# Altium integrated library Modulos.IntLib: 25 symbols
Pins are listed as number, name and electrical type; pins without a type are passive.

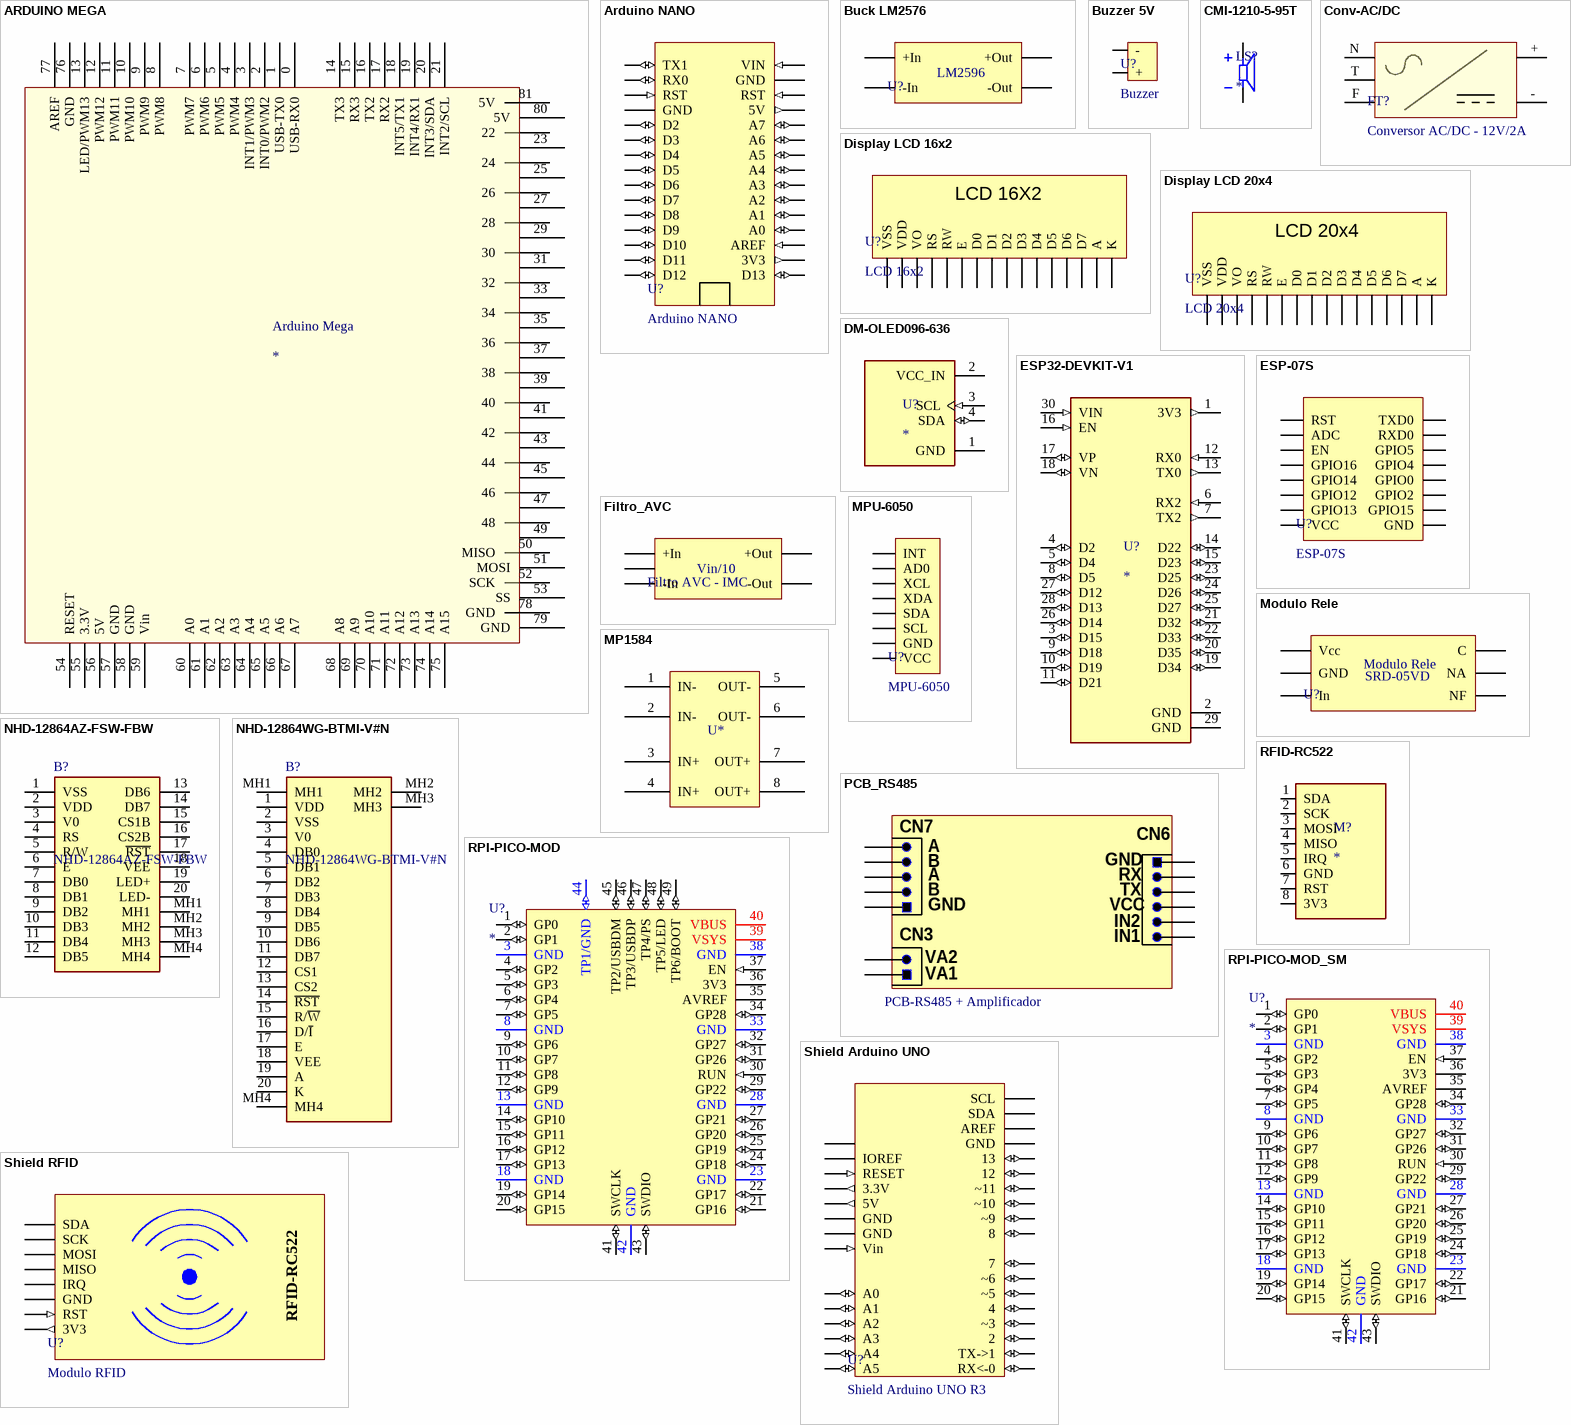
[diagram p0: symbols ARDUINO MEGA to Shield RFID]

## ARDUINO MEGA
designator Arduino Mega
footprint ARDUINO MEGA (Arduino Mega 2560)
pins: 0 USB-RX0, 1 USB-TX0, 2 INT0/PWM2, 3 INT1/PWM3, 4 PWM4, 5 PWM5, 6 PWM6, 7 PWM7, 8 PWM8, 9 PWM9, 10 PWM10, 11 PWM11, 12 PWM12, 13 LED/PWM13, 14 TX3, 15 RX3, 16 TX2, 17 RX2, 18 INT5/TX1, 19 INT4/RX1, 20 INT3/SDA, 21 INT2/SCL, 22, 23, 24, 25, 26, 27, 28, 29, 30, 31, 32, 33, 34, 35, 36, 37, 38, 39, 40, 41, 42, 43, 44, 45, 46, 47, 48, 49, 50 MISO, 51 MOSI, 52 SCK, 53 SS, 54 RESET, 55 3.3V, 56 5V, 57 GND, 58 GND, 59 Vin, 60 A0, 61 A1, 62 A2, 63 A3, 64 A4, 65 A5, 66 A6, 67 A7, 68 A8, 69 A9, 70 A10, 71 A11, 72 A12, 73 A13, 74 A14, 75 A15, 76 GND, 77 AREF, 78 GND, 79 GND, 80 5V, 81 5V

## Arduino NANO
designator U?
footprint Arduino NANO
pins: 0 D13 (io), 1 3V3 (out), 2 AREF (in), 3 A0 (io), 4 A1 (io), 5 A2 (io), 6 A3 (io), 7 A4 (io), 8 A5 (io), 9 A6 (io), 10 A7 (io), 11 5V (out), 12 RST (in), 13 GND (power), 14 VIN (in), 15 D12 (io), 16 D11 (io), 17 D10 (io), 18 D9 (io), 19 D8 (io), 20 D7 (io), 21 D6 (io), 22 D5 (io), 23 D4 (io), 24 D3 (io), 25 D2 (io), 26 GND (power), 27 RST (in), 28 RX0 (io), 29 TX1 (io)

## Buck LM2576
designator U?, comment Buck  (value not drawn)
Conversor DC-DC LM2576
footprint Buck LM2596
pins: 1 -In, 2 +In, 3 +Out, 4 -Out
text: LM2596

## Buzzer 5V
designator U?, comment Buzzer
Buzzers Indicator, Internally Driven Magnetic 5V 30mA 2.73kHz 82dB @ 5V, 10cm Through Hole PC Pins; Partnumber: AI-1027-TWT-5V-2-R
footprint Buzzer (AI-1027-TWT-5V-2-R)
pins: 1 +, 2 -

## CMI-1210-5-95T
designator LS?
12 mm, 5 Vdc, 98 dB, Through Hole, Magnetic Audio Indicator Buzzer; MF: Same Sky; MP: CMI-1210-5-95T; SnapEDA_Link: https://www.snapeda.com/parts/CMI-1210-5-95T/Same+Sky/view-part/?ref=snap; Package: None; Value: *; Check_prices: https://www.snapeda.com/parts/CMI-1210-5-95T/Same+Sky/view-part/?ref=eda
footprint XDCR_CMI-1210-5-95T
pins: N, P

## Conv-AC/DC
designator FT?, comment Conversor AC/DC - 12V/2A
Fonte chaveada AC/DC
pins: + 4, - 5, F 1, N 3, T 2

## Display LCD 16x2
designator U?, comment LCD 16x2
footprint LCD 16X2
pins: A, D0, D1, D2, D3, D4, D5, D6, D7, E, K, RS, RW, VDD, VO, VSS
text: LCD 16X2

## Display LCD 20x4
designator U?, comment LCD 20x4
footprint LCD 20X4
pins: A, D0, D1, D2, D3, D4, D5, D6, D7, E, K, RS, RW, VDD, VO, VSS

## DM-OLED096-636
designator U?
0.96â€ 128 X 64 MONOCHROME GRAPHIC OLED DISPLAY MODULE - I2C; MP: DM-OLED096-636; SnapEDA_Link: https://www.snapeda.com/parts/DM-OLED096-636/Display+Module/view-part/?ref=snap; Package: Package; Value: *; MF: Display Module; Check_prices: https://www.snapeda.com/parts/DM-OLED096-636/Display+Module/view-part/?ref=eda
footprint MODULE_DM-OLED096-636
pins: 1 GND (power), 2 VCC_IN (power), 3 SCL (in), 4 SDA (io)

## ESP32-DEVKIT-V1
designator U?
Dual core, Wi-Fi: 2.4 GHz up to 150 Mbits/s,BLE (Bluetooth Low Energy) and legacy Bluetooth, 32 bits, Up to 240 MHz; MF: Do it; MP: ESP32-DEVKIT-V1; SnapEDA_Link: https://www.snapeda.com/parts/ESP32-DEVKIT-V1/Do+it/view-part/?ref=snap; Package: None; Value: *; Check_prices: https://www.snapeda.com/parts/ESP32-DEVKIT-V1/Do+it/view-part/?ref=eda
footprint MODULE_ESP32_DEVKIT_V1
pins: 1 3V3 (out), 2 GND (power), 3 D15 (io), 4 D2 (io), 5 D4 (io), 6 RX2 (in), 7 TX2 (out), 8 D5 (io), 9 D18 (io), 10 D19 (io), 11 D21 (io), 12 RX0 (in), 13 TX0 (out), 14 D22 (io), 15 D23 (io), 16 EN (in), 17 VP (io), 18 VN (io), 19 D34 (io), 20 D35 (io), 21 D32 (io), 22 D33 (io), 23 D25 (io), 24 D26 (io), 25 D27 (io), 26 D14 (io), 27 D12 (io), 28 D13 (io), 29 GND (power), 30 VIN (in)

## ESP-07S
designator U?
WiFi Module 2.4GHz ESP-07S
footprint ESP-07S (ESP-07S WIFI MODULE)
pins: 1 RST, 2 ADC, 3 EN, 4 GPIO16, 5 GPIO14, 6 GPIO12, 7 GPIO13, 8 VCC, 9 GND, 10 GPIO15, 11 GPIO2, 12 GPIO0, 13 GPIO4, 14 GPIO5, 15 RXD0, 16 TXD0

## Filtro_AVC
designator Filtro AVC - IMC, comment Filtro AVC  (value not drawn)
Filtro para leitura de tensão AVC (Div10)
pins: +In, +Out, -In, -Out, NC
text: Vin/10

## Modulo Rele
designator U?  (value not drawn)
Modulo Rele Arduino
pins: C, GND, In, NA, NF, Vcc
text: SRD-05VD

## MP1584
designator U*, comment DC-DC Regulator  (value not drawn)
MP1584 DC to DC Converter and Switching Regulator Chip 0.8VDC to 18VDC Output Development Tool
footprint MP1584 (MP1584 DC to DC Converter and Switching Regulator Chip 0.8VDC to 18VDC Output Development Tool)
pins: 1 IN-, 2 IN-, 3 IN+, 4 IN+, 5 OUT-, 6 OUT-, 7 OUT+, 8 OUT+

## MPU-6050
designator U?
Triple Axis Accelerometer and Gyro Breakout Board‎
footprint MPU-6050
pins: AD0, GND, INT, SCL, SDA, VCC, XCL, XDA

## NHD-12864AZ-FSW-FBW
designator B?
LCD Graphic Display Modules & Accessories 128 x 64 FSTN(+) 93.0 x 70.0; Manufacturer_Name: Newhaven Display; Geometry.Height: 10.6mm; Mouser Part Number: 763-NHD12864AZFSWFBW; Mouser Price/Stock: https://www.mouser.co.uk/ProductDetail/Newhaven-Display/NHD-12864AZ-FSW-FBW?qs=3vk7fz9CmNxdfqtmwt0T7w%3D%3D; Manufacturer_Part_Number: NHD-12864AZ-FSW-FBW; Datasheet Link: https://componentsearchengine.com/Datasheets/1/NHD-12864AZ-FSW-FBW.pdf
footprint NHD12864AZFSWFBW
pins: 1 VSS, 2 VDD, 3 V0, 4 RS, 5 R/W, 6 E, 7 DB0, 8 DB1, 9 DB2, 10 DB3, 11 DB4, 12 DB5, 13 DB6, 14 DB7, 15 CS1B, 16 CS2B, 17 ~{RST}, 18 VEE, 19 LED+, 20 LED-, MH1, MH2, MH3, MH4

## NHD-12864WG-BTMI-V#N
designator B?
LCD MOD GRAPH 128X64 WH TRANSM; Manufacturer_Name: Newhaven Display; Geometry.Height: 8.9mm; Mouser Part Number: 763-12864WG-BTMI-VN; Mouser Price/Stock: https://www.mouser.co.uk/ProductDetail/Newhaven-Display/NHD-12864WG-BTMI-VN?qs=Vb5qD4CGh4lOc3Gh14yA5A%3D%3D; Manufacturer_Part_Number: NHD-12864WG-BTMI-V#N; Datasheet Link: http://www.newhavendisplay.com/specs/NHD-12864WG-BTMI-VN.pdf
footprint NHD12864WGBTMIVN
pins: 1 VDD, 2 VSS, 3 V0, 4 DB0, 5 DB1, 6 DB2, 7 DB3, 8 DB4, 9 DB5, 10 DB6, 11 DB7, 12 CS1, 13 CS2, 14 ~{RST}, 15 R/~{W}, 16 D/~{I}, 17 E, 18 VEE, 19 A, 20 K, MH1, MH2, MH3, MH4

## PCB_RS485
designator PCB?, comment PCB-RS485 + Amplificador
pins: 1, 2, 3, 4, 5, 6, 7, 8, 9, 10, 11, 12, 13
text: CN7; CN6; A; GND; B; RX; TX; VCC; IN2; CN3; IN1; VA2; VA1

## RFID-RC522
designator M?
Development kit in an integrated reader/writer IC MFRC522 for contactless communication at 13.56 MHz.; MF: Handson Technology; MP: RFID-RC522; SnapEDA_Link: https://www.snapeda.com/parts/RFID-RC522/Handson+Technology/view-part/?ref=snap; Package: Package; Value: *; Check_prices: https://www.snapeda.com/parts/RFID-RC522/Handson+Technology/view-part/?ref=eda
footprint RFID-RC522
pins: 1 SDA (io), 2 SCK (io), 3 MOSI (io), 4 MISO (io), 5 IRQ (io), 6 GND (io), 7 RST (io), 8 3V3 (io)

## RPI-PICO-MOD
designator U?
RASPBERRY PI PICO RP2040 BOARD; Manufacturer: Raspberry Pi Foundation; Manufacturer Part No: SC0915; Mounting Technology: SMT; Supplier: DigiKey; Supplier Part No: 2648-SC0915CT-ND; Supplier Link: https://www.digikey.com/en/products/detail/raspberry-pi/SC0915/13684020
footprint RPI-PICO-MOD (RASPBERRY PI PICO RP2040 BOARD)
pins: 1 GP0 (io), 2 GP1 (io), 3 GND (power), 4 GP2 (io), 5 GP3 (io), 6 GP4 (io), 7 GP5 (io), 8 GND (power), 9 GP6 (io), 10 GP7 (io), 11 GP8 (io), 12 GP9 (io), 13 GND (power), 14 GP10 (io), 15 GP11 (io), 16 GP12 (io), 17 GP13 (io), 18 GND (power), 19 GP14 (io), 20 GP15 (io), 21 GP16 (io), 22 GP17 (io), 23 GND (power), 24 GP18 (io), 25 GP19 (io), 26 GP20 (io), 27 GP21 (io), 28 GND (power), 29 GP22 (io), 30 RUN (in), 31 GP26 (io), 32 GP27 (io), 33 GND (power), 34 GP28 (io), 35 AVREF (power), 36 3V3 (power), 37 EN (in), 38 GND (power), 39 VSYS (power), 40 VBUS (power), 41 SWCLK (io), 42 GND (power), 43 SWDIO (io), 44 TP1/GND (io), 45 TP2/USBDM (io), 46 TP3/USBDP (io), 47 TP4/PS (io), 48 TP5/LED (io), 49 TP6/BOOT (io)

## RPI-PICO-MOD_SM
designator U?
RASPBERRY PI PICO RP2040 BOARD NO TEST PADS; Manufacturer: Raspberry Pi Foundation; Manufacturer Part No: SC0915; Mounting Technology: SMT; Supplier: DigiKey; Supplier Part No: 2648-SC0915CT-ND; Supplier Link: https://www.digikey.com/en/products/detail/raspberry-pi/SC0915/13684020
footprint RPI-PICO-MOD (RASPBERRY PI PICO RP2040 BOARD)
pins: 1 GP0 (io), 2 GP1 (io), 3 GND (power), 4 GP2 (io), 5 GP3 (io), 6 GP4 (io), 7 GP5 (io), 8 GND (power), 9 GP6 (io), 10 GP7 (io), 11 GP8 (io), 12 GP9 (io), 13 GND (power), 14 GP10 (io), 15 GP11 (io), 16 GP12 (io), 17 GP13 (io), 18 GND (power), 19 GP14 (io), 20 GP15 (io), 21 GP16 (io), 22 GP17 (io), 23 GND (power), 24 GP18 (io), 25 GP19 (io), 26 GP20 (io), 27 GP21 (io), 28 GND (power), 29 GP22 (io), 30 RUN (in), 31 GP26 (io), 32 GP27 (io), 33 GND (power), 34 GP28 (io), 35 AVREF (power), 36 3V3 (power), 37 EN (in), 38 GND (power), 39 VSYS (power), 40 VBUS (power), 41 SWCLK (io), 42 GND (power), 43 SWDIO (io)

## Shield Arduino UNO
designator U?, comment Shield Arduino UNO R3
Shield for Arduino UNO R3 Board
footprint Shield_UNO
pins: 0 RX<-0 (io), 1 TX->1 (io), 2 (io), 3 ~3 (io), 4 (io), 5 ~5 (io), 6 ~6 (io), 7 (io), 8 (io), 9 ~9 (io), 10 ~10 (io), 11 ~11 (io), 12 (io), 13 (io), 14 GND, 15 AREF, 16 SDA, 17 SCL, 18 A5 (io), 19 A4 (io), 20 A3 (io), 21 A2 (io), 22 A1 (io), 23 A0 (io), 24 Vin (in), 25 GND, 26 GND, 27 5V (out), 28 3.3V (out), 29 RESET (in), 30 IOREF, 31

## Shield RFID
designator U?, comment Modulo RFID
Shield Tag RFID Reader RC522
footprint RFID-RC522
pins: 1 3V3 (out), 2 RST (in), 3 GND (power), 4 IRQ, 5 MISO, 6 MOSI, 7 SCK, 8 SDA
text: RFID-RC522

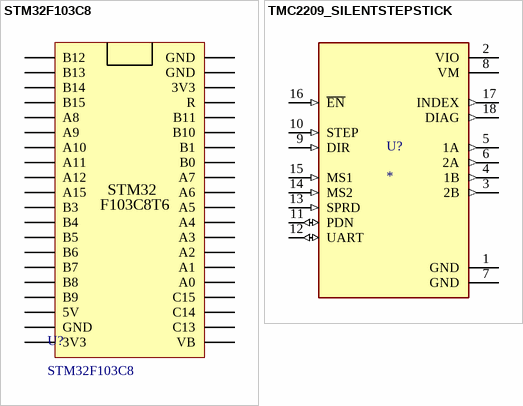
[diagram p1: symbols STM32F103C8 to TMC2209_SILENTSTEPSTICK]

## STM32F103C8
designator U?
Placa De Desenvolvimento Stm32f103c8t6 Arm
footprint STM32F103C8
pins: 1 B12, 2 B13, 3 B14, 4 B15, 5 A8, 6 A9, 7 A10, 8 A11, 9 A12, 10 A15, 11 B3, 12 B4, 13 B5, 14 B6, 15 B7, 16 B8, 17 B9, 18 5V, 19 GND, 20 3V3, 21 VB, 22 C13, 23 C14, 24 C15, 25 A0, 26 A1, 27 A2, 28 A3, 29 A4, 30 A5, 31 A6, 32 A7, 33 B0, 34 B1, 35 B10, 36 B11, 37 R, 38 3V3, 39 GND, 40 GND
text: STM32; F103C8T6

## TMC2209_SILENTSTEPSTICK
designator U?
TMC2209 Motor Controller/Driver Power Management Evaluation Board; MP: TMC2209 SILENTSTEPSTICK; MF: Trinamic Motion Control GmbH; Check_prices: https://www.snapeda.com/parts/TMC2209%20SILENTSTEPSTICK/Trinamic+Motion+Control+GmbH/view-part/?ref=eda; Price: None; SnapEDA_Link: https://www.snapeda.com/parts/TMC2209%20SILENTSTEPSTICK/Trinamic+Motion+Control+GmbH/view-part/?ref=snap; Availability: In Stock; Value: *; Purchase-URL: https://pricing.snapeda.com/search/part/TMC2209 SILENTSTEPSTICK/?ref=eda; Package: None
footprint MODULE_TMC2209_SILENTSTEPSTICK
pins: 1 GND (power), 2 VIO (power), 3 2B (out), 4 1B (out), 5 1A (out), 6 2A (out), 7 GND (power), 8 VM (power), 9 DIR (in), 10 STEP (in), 11 PDN (io), 12 UART (io), 13 SPRD (in), 14 MS2 (in), 15 MS1 (in), 16 ~{EN} (in), 17 INDEX (out), 18 DIAG (out)